# EAGLE library part ADF4117BRUZ-RL7 (library ADF4117BRUZ-RL7)
Single, Integer-N 1.2 GHz PLL Source: Datasheet <https://www.analog.com/ADF4117/datasheet>
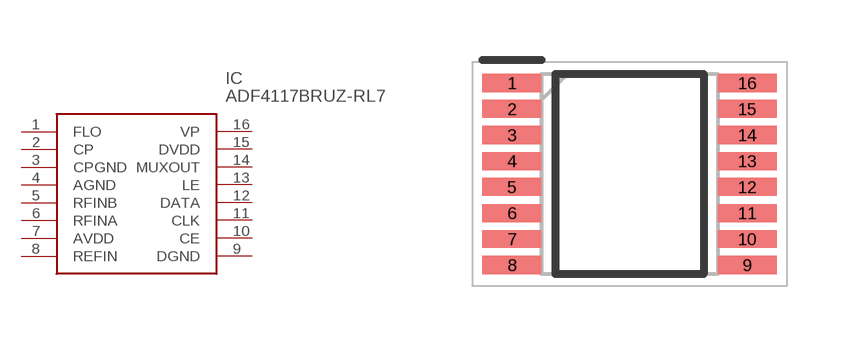
[diagram p0: symbol with the pads of SOP65P640X120-16N; footprint SOP65P640X120-16N]

Designator prefix IC

## ADF4117BRUZ-RL7 (Description: Single, Integer-N 1.2 GHz PLL; Height: 1.2mm; Manufacturer_Name: Analog Devices; Manufacturer_Part_Number: ADF4117BRUZ-RL7; Mouser_Part_Number: 584-ADF4117BRUZ-R7; Mouser_Price-Stock: https://www.mouser.co.uk/ProductDetail/Analog-Devices/ADF4117BRUZ-RL7?qs=BpaRKvA4VqF9w8dTySOKZw%3D%3D)  [SOP65P640X120-16N]
1  FLO
2  CP
3  CPGND
4  AGND
5  RFINB
6  RFINA
7  AVDD
8  REFIN
9  DGND
10  CE
11  CLK
12  DATA
13  LE
14  MUXOUT
15  DVDD
16  VP

## Footprint SOP65P640X120-16N (pad centres in mm)
RU-16
smd 1.475 x 0.45: 1 -2.938,2.275; 2 -2.938,1.625; 3 -2.938,0.975; 4 -2.938,0.325; 5 -2.938,-0.325; 6 -2.938,-0.975; 7 -2.938,-1.625; 8 -2.938,-2.275; 9 2.938,-2.275; 10 2.938,-1.625; 11 2.938,-0.975; 12 2.938,-0.325; 13 2.938,0.325; 14 2.938,0.975; 15 2.938,1.625; 16 2.938,2.275